# Altium footprint library Connectors.PcbLib: 305 footprints (part 7 of 20)
Each footprint in its own frame and in the unit in brackets; x right, y up, seen from the top. Pads: shape width x height; smd on the part's side, far side on the other; paste and mask are expansions set on the pad; w line width, h text height; cw(c..) or ccw(c..) is an arc to the next point about the centre after c.
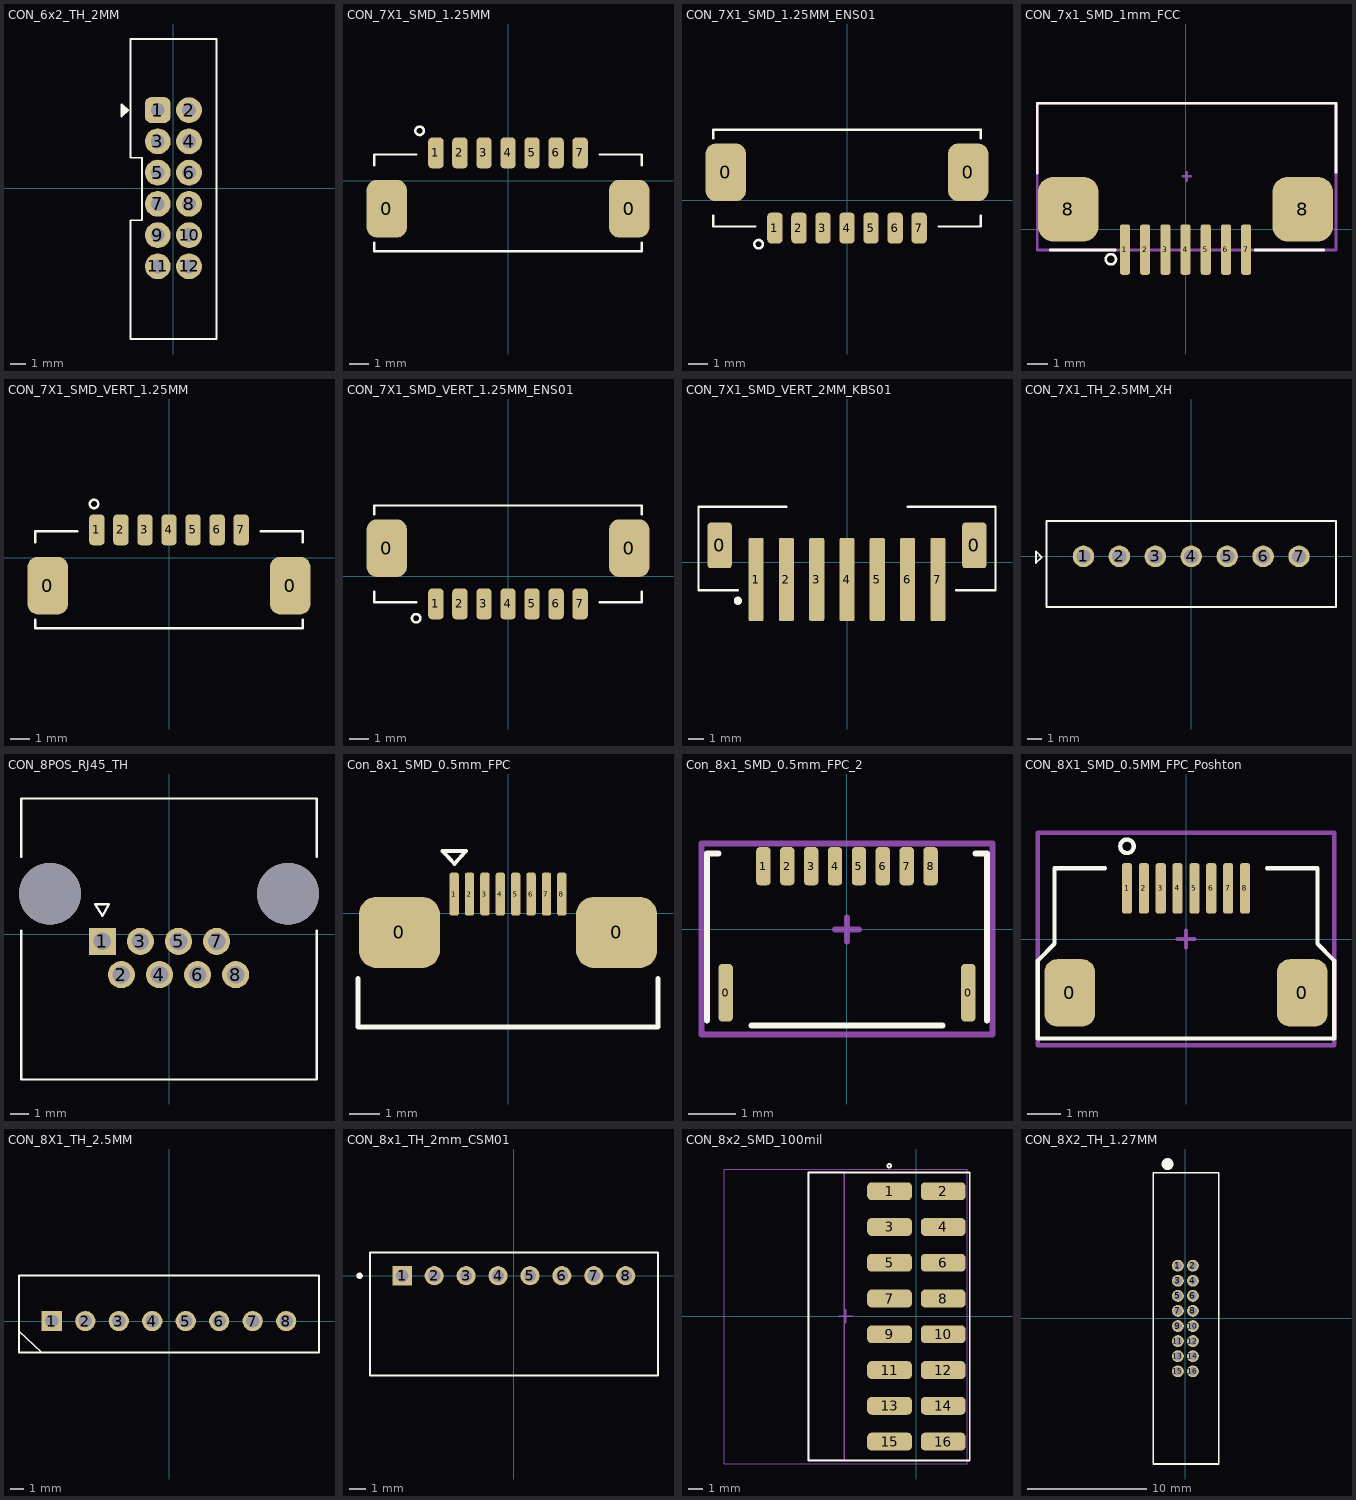
[diagram p6: the footprints below, top view; thin cyan lines are the x and y axes]

## CON_6x2_TH_2MM [mil] "/ 20190410 / C-D.Viveros"
pads (12):
  rrect50% 65x65 hole 35: 1(-39.37,196.85)
  round 65 hole 35: 2(39.37,196.85) 3(-39.37,118.11) 4(39.37,118.11) 5(-39.37,39.37) 6(39.37,39.37) 7(-39.37,-39.37) 8(39.37,-39.37) 9(-39.37,-118.11) 10(39.37,-118.11) 11(-39.37,-196.85) 12(39.37,-196.85)
Top Overlay:
  region: -130.49,211.28 -130.49,181.28 -114.17,196.85
  lines w5: -108.27,-379.93 108.27,-379.93 108.27,375.98 ; -108.27,-379.92 -108.27,-80.71 -78.74,-80.71 -78.74,76.77 -108.27,76.77 -108.27,375.98 108.27,375.98 ; 108.27,375.98 108.27,375.98 ; -130.49,181.28 -114.17,196.85 -130.49,211.28 -130.49,181.28
3D body "957212-6002-AR.stp": height 222.44, standoff -118.11, extent -108.27,-379.92 108.27,375.98

## CON_7X1_SMD_1.25MM [mm] "/ 20220502 / J-E.Pachon"
pads (9):
  rrect50% 2.1x3 smd: 0(-6.3,-1.45) 0(6.3,-1.45)
  rrect50% 0.8x1.6 smd: 1(-3.75,1.45) 2(-2.5,1.45) 3(-1.25,1.45) 4(0,1.45) 5(1.25,1.45) 6(2.5,1.45) 7(3.75,1.45)
Top Overlay:
  circle w0.127: c-4.6,2.6 r0.22
  lines w0.127: -6.95,-3.225 -6.95,-3.67 6.95,-3.67 6.95,-3.225 ; -6.95,0.8 -6.95,1.37 -4.775,1.37 ; 4.775,1.37 6.95,1.37 6.95,0.8
3D body "532610771.stp": height 3.41, standoff 0.01, extent -6.95,-3.225 6.95,1.975

## CON_7X1_SMD_1.25MM_ENS01 [mm] "/ 20220502 / J-E.Pachon"
pads (9):
  rrect50% 2.1x3 smd: 0(-6.3,1.45) 0(6.3,1.45)
  rrect50% 0.8x1.6 smd: 1(-3.75,-1.45) 2(-2.5,-1.45) 3(-1.25,-1.45) 4(0,-1.45) 5(1.25,-1.45) 6(2.5,-1.45) 7(3.75,-1.45)
Top Overlay:
  circle w0.127: c-4.6,-2.29 r0.22
  lines w0.127: -6.95,-0.8 -6.95,-1.37 -4.775,-1.37 ; -6.95,3.225 -6.95,3.67 6.95,3.67 6.95,3.225 ; 4.775,-1.37 6.95,-1.37 6.95,-0.8
3D body "532610771.stp": height 3.41, standoff 0.01, extent -6.95,-1.975 6.95,3.225

## CON_7x1_SMD_1mm_FCC [mm] "/ 20190222 / C-A.Serna.A"
pads (9):
  rrect50% 0.5x2.5 smd: 1(-3,-1) 2(-2,-1) 3(-1,-1) 4(0,-1) 5(1,-1) 6(2,-1) 7(3,-1)
  rrect50% 3x3.2 smd: 8(-5.8,1) 8(5.8,1)
Top Overlay:
  circle w0.127: c-3.696,-1.483 r0.254
  lines w0.127: -7.338,2.785 -7.338,6.239 7.445,6.239 7.445,2.81 ; -6.703,-1.025 -3.477,-1.025 ; 3.457,-1.025 6.835,-1.025
Mechanical 1:
  lines w0.127: -7.338,-1.025 -7.338,6.239 7.445,6.239 7.445,-1.025 -7.338,-1.025
Mechanical 15:
  lines w0.127: -0.146,2.617 0.254,2.617 ; 0.054,2.417 0.054,2.817 ; -7.338,-1.025 -7.338,6.239 7.445,6.239 7.445,-1.025 -7.338,-1.025
3D body: height 2.5, standoff 0, extent -7.338,-1.025 7.445,6.239

## CON_7X1_SMD_VERT_1.25MM [mm] "/ 20220216 / J-E.Pachon"
pads (9):
  rrect50% 2.1x3 smd: 0(-6.3,-1.45) 0(6.3,-1.45)
  rrect50% 0.8x1.6 smd: 1(-3.75,1.45) 2(-2.5,1.45) 3(-1.25,1.45) 4(0,1.45) 5(1.25,1.45) 6(2.5,1.45) 7(3.75,1.45)
Top Overlay:
  circle w0.127: c-3.9,2.8 r0.22
  lines w0.127: -6.95,-3.225 -6.95,-3.67 6.95,-3.67 6.95,-3.225 ; -6.95,0.8 -6.95,1.37 -4.775,1.37 ; 4.775,1.37 6.95,1.37 6.95,0.8
3D body "53398-0771--3DModel-STEP-361473.STEP": height 4.74, standoff 0, extent -6.95,-2.9 6.95,1.3

## CON_7X1_SMD_VERT_1.25MM_ENS01 [mm] "/ 20220502 / J-E.Pachon"
pads (9):
  rrect50% 2.1x3 smd: 0(-6.3,1.45) 0(6.3,1.45)
  rrect50% 0.8x1.6 smd: 1(-3.75,-1.45) 2(-2.5,-1.45) 3(-1.25,-1.45) 4(0,-1.45) 5(1.25,-1.45) 6(2.5,-1.45) 7(3.75,-1.45)
Top Overlay:
  circle w0.127: c-4.775,-2.191 r0.22
  lines w0.127: -6.95,-0.8 -6.95,-1.37 -4.775,-1.37 ; -6.95,3.225 -6.95,3.67 6.95,3.67 6.95,3.225 ; 4.775,-1.37 6.95,-1.37 6.95,-0.8
3D body "53398-0771--3DModel-STEP-361473.STEP": height 4.74, standoff 0, extent -6.95,-1.3 6.95,2.9

## CON_7X1_SMD_VERT_2MM_KBS01 [mm] "/ 20220810/ C-E.Rincon"
pads (9):
  rrect25% 1.6x3 smd: 0(-8.4,1.125) 0(8.4,1.125)
  rrect25% 1x5.5 smd: 1(-6,-1.125) 2(-4,-1.125) 3(-2,-1.125) 4(0,-1.125) 5(2,-1.125) 6(4,-1.125) 7(6,-1.125)
Top Overlay:
  circle w0.254: c-7.2,-2.525 r0.141
  lines w0.152: -7.2,-1.825 -9.8,-1.825 -9.8,3.675 -4,3.675 ; 4,3.675 9.8,3.675 9.8,-1.825 7.2,-1.825
3D body "620307124022 (rev1).stp": height 6.71, standoff -0.07, extent -9,-3.325 9,3.685

## CON_7X1_TH_2.5MM_XH [mil] "/E.Naranjo / 20220216"
pads (7):
  round 59 hole 39: 1(-295.28,0) 2(-196.85,0) 3(-98.43,0) 4(0,0) 5(98.43,0) 6(196.85,0) 7(295.28,0)
Top Overlay:
  lines w5: -425.2,-17.95 -425.2,-17.95 ; -425.2,-17.95 -425.2,-17.95 ; -425.2,-17.95 -425.2,13.55 -409.45,-2.2 -425.2,-17.95
  lines w6: -396.5,-138.86 396.5,-138.86 396.5,97.14 -396.5,97.14 -396.5,-138.86
Bottom Overlay:
  lines w5: -425.2,-17.95 -409.45,-2.2 -425.2,13.55 -425.2,-17.95
3D body "B7B-XH-A_LF__SN_.stp": height 276.09, standoff -133.36, extent -391.73,-133.86 391.73,92.52
3D body: height 10, standoff 0, extent 285.28,-10 295.28,0

## CON_8POS_RJ45_TH [mil] "/20220712/F-A.Ospina"
pads (10):
  rect 57x57 hole 37: 1(-140,-15)
  round 57 hole 37: 2(-100,-85) 3(-60,-15) 4(-20,-85) 5(20,-15) 6(60,-85) 7(100,-15) 8(140,-85)
  round 130 hole 130 unplated: ""(-250,85) ""(250,85)
Top Overlay:
  lines w5: -310.04,7.44 -310.04,-305.16 310.04,-305.16 310.04,7.44 ; -310.04,162.56 -310.04,285 310.04,285 310.04,162.56 ; -155,62.66 -140,62.66 -126.02,62.66 -140,39.04 -155,62.66
3D body "RJHSE-5080--3DModel-STEP-56544.STEP": height 510.5, standoff -134.5, extent -310.45,-306.03 309.55,283.97

## Con_8x1_SMD_0.5mm_FPC [mil] "/20230620/J-A.Sepulveda"
pads (10):
  rrect50% 104x91 smd: 0(-139,-24.5) 0(139,-24.5)
  rrect50% 12x55 smd: 1(-68.9,24.5) 2(-49.21,24.5) 3(-29.53,24.5) 4(-9.84,24.5) 5(9.84,24.5) 6(29.53,24.5) 7(49.21,24.5) 8(68.9,24.5)
Top Overlay:
  lines w5: -83.89,79.62 -53.89,79.62 -68.33,63.3 -83.89,79.62
  lines w6: -192,-83.06 -192,-145.5 192,-145.5 192,-83.06
3D body "527450833.stp": height 79.44, standoff 0.5, extent -198.82,-149.44 198.82,47.41

## Con_8x1_SMD_0.5mm_FPC_2 [mm] "5034800800 / 20230914 / H-D.Garcia"
pads (10):
  rrect50% 0.3x1.2 smd: 0(-2.54,-1.325) 0(2.54,-1.325)
  rrect50% 0.3x0.8 smd: 1(-1.75,1.325) 2(-1.25,1.325) 3(-0.75,1.325) 4(-0.25,1.325) 5(0.25,1.325) 6(0.75,1.325) 7(1.25,1.325) 8(1.75,1.325)
Top Overlay:
  lines w0.127: -2.928,-1.91 -2.928,1.59 -2.692,1.59 ; -2,-2.011 2,-2.011 ; 2.688,1.59 2.928,1.59 2.928,-1.91
Mechanical 15:
  lines w0.127: -0.25,0 0.25,0 ; 0,-0.25 0,0.25 ; -3.05,-2.2 3.05,-2.2 3.05,1.8 -3.05,1.8 -3.05,-2.2
3D body "5034800800.stp": height 1.85, standoff -0.02, extent -2.85,-2 2.85,1.6

## CON_8X1_SMD_0.5MM_FPC_Poshton [mm] "0.5-8P-H2.0-?? / 20230914 / H-D.Garcia"
pads (10):
  rrect50% 1.5x2 smd mask+0.102: 0(-3.45,-1.6) 0(3.45,-1.6)
  rrect50% 0.3x1.5 smd mask+0.102: 1(-1.75,1.5) 2(-1.25,1.5) 3(-0.75,1.5) 4(-0.25,1.5) 5(0.25,1.5) 6(0.75,1.5) 7(1.25,1.5) 8(1.75,1.5)
Top Overlay:
  circle w0.127: c-1.75,2.75 r0.2
  lines w0.127: -2.4,2.1 -3.9,2.1 -3.9,-0.142 -4.395,-0.637 -4.395,-2.95 4.395,-2.95 4.395,-0.637 3.9,-0.142 3.9,2.1 2.4,2.1
Mechanical 15:
  lines w0.127: -0.25,0 0.25,0 ; 0,-0.25 0,0.25 ; -4.395,-3.15 -4.395,3.15 4.395,3.15 4.395,-3.15 -4.395,-3.15
3D body "XF2M_0815_1A.step": height 2.01, standoff 0.01, extent -4.05,-2.95 4.05,2.95

## CON_8X1_TH_2.5MM [mm] "20220608 / E.Naranjo"
pads (8):
  rect 1.508x1.508 hole 1: 1(-8.75,0)
  round 1.508 hole 1: 2(-6.25,0) 3(-3.75,0) 4(-1.25,0) 5(1.25,0) 6(3.75,0) 7(6.25,0) 8(8.75,0)
Top Overlay:
  lines w0.127: -11.2,-0.754 -9.504,-2.35 ; -11.2,-2.35 -11.2,3.4 11.2,3.4 11.2,-2.35 -11.2,-2.35
3D body "B8B-XH-A-LF--SN---3DModel-STEP-418109.STEP": height 6.51, standoff -3.89, extent -11.2,-2.342 11.2,3.408

## CON_8x1_TH_2mm_CSM01 [mm] "/20210118/V-A.Patino"
height 4.95
pads (8):
  rect 1.2x1.2 hole 0.762: 1(-7,0)
  round 1.2 hole 0.762: 2(-5,0) 3(-3,0) 4(-1,0) 5(1,0) 6(3,0) 7(5,0) 8(7,0)
Top Overlay:
  circle w0.2: c-9.673,0 r0.1
  lines w0.127: -9.023,-6.25 9.023,-6.25 9.023,1.45 -9.023,1.45 -9.023,-6.25
3D body "c-440055-8-b3-3d.stp": height 4.96, standoff -3.39, extent -9.023,-6.25 8.977,1.45

## CON_8x2_SMD_100mil [mm] "/ 20190606 / J-P.Vargas.A"
pads (16):
  rrect50% 3.18x1.27 smd: 1(-1.905,8.89) 2(1.905,8.89) 3(-1.905,6.35) 4(1.905,6.35) 5(-1.905,3.81) 6(1.905,3.81) 7(-1.905,1.27) 8(1.905,1.27) 9(-1.905,-1.27) 10(1.905,-1.27) 11(-1.905,-3.81) 12(1.905,-3.81) 13(-1.905,-6.35) 14(1.905,-6.35) 15(-1.905,-8.89) 16(1.905,-8.89)
Top Overlay:
  circle w0.127: c-1.93,10.693 r0.13
  lines w0.127: -7.671,-10.225 3.785,-10.225 3.785,10.225 -7.671,10.225 -7.671,-10.225
Mechanical 1:
  lines w0.1: -7.671,-10.225 -7.671,10.225 -5.131,10.225 -5.131,-10.225 -7.671,-10.225
Mechanical 15:
  lines w0.05: -13.642,-10.45 3.62,-10.45 ; -13.642,10.45 3.62,10.45 ; -13.641,-10.45 -13.641,10.45 ; 3.62,-10.45 3.62,10.45
  lines w0.1: -5.511,0 -4.511,0 ; -5.011,-0.5 -5.011,0.5
3D body "TSM-108-01-X-DH.step": height 6.1, standoff 0, extent -13.517,-10.16 2.739,10.16

## CON_8X2_TH_1.27MM [mm] "20220223 / E.Naranjo"
pads (16):
  round 1 hole 0.7: 1(-0.635,4.445) 2(0.635,4.445) 3(-0.635,3.175) 4(0.635,3.175) 5(-0.635,1.905) 6(0.635,1.905) 7(-0.635,0.635) 8(0.635,0.635) 9(-0.635,-0.635) 10(0.635,-0.635) 11(-0.635,-1.905) 12(0.635,-1.905) 13(-0.635,-3.175) 14(0.635,-3.175) 15(-0.635,-4.445) 16(0.635,-4.445)
Top Overlay:
  circle w1: c-1.5,13 r0.01
  lines w0.127: -2.7,-12.255 -2.7,12.255 2.8,12.255 2.8,-12.255 -2.7,-12.255
3D body "3210-16-001-12-00 3D.STEP": height 11.06, standoff -2.39, extent -2.7,-12.255 2.8,12.255